# Altium schematic symbol library TCAN1042GVDQ1.SchLib: 1 symbol
Pins are listed as number, name and electrical type; pins without a type are passive.

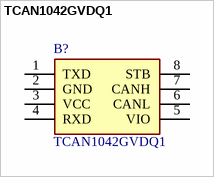
[diagram p0: symbol TCAN1042GVDQ1]

## TCAN1042GVDQ1
designator B?
Automotive Fault Protected CAN Transceiver With Flexible Data-Rate; Manufacturer_Name: Texas Instruments; Geometry.Height: 1.75mm; Manufacturer_Part_Number: TCAN1042GVDQ1; Mouser Part Number: 595-TCAN1042GVDQ1; Mouser Price/Stock: https://www.mouser.co.uk/ProductDetail/Texas-Instruments/TCAN1042GVDQ1?qs=yDQnu9hAfI8SnSPrz59qBA%3D%3D; Arrow Part Number: TCAN1042GVDQ1; Arrow Price/Stock: https://www.arrow.com/en/products/tcan1042gvdq1/texas-instruments; Datasheet Link: http://www.ti.com/lit/gpn/tcan1042gv-q1
footprint SOIC127P600X175-8N
pins: 1 TXD, 2 GND, 3 VCC, 4 RXD, 5 VIO, 6 CANL, 7 CANH, 8 STB